# Altium footprint library SYNCBOX_TST.PcbLib: 267 footprints (part 7 of 17)
Each footprint in its own frame and in the unit in brackets; x right, y up, seen from the top. Pads: shape width x height; smd on the part's side, far side on the other; paste and mask are expansions set on the pad; w line width, h text height; cw(c..) or ccw(c..) is an arc to the next point about the centre after c.
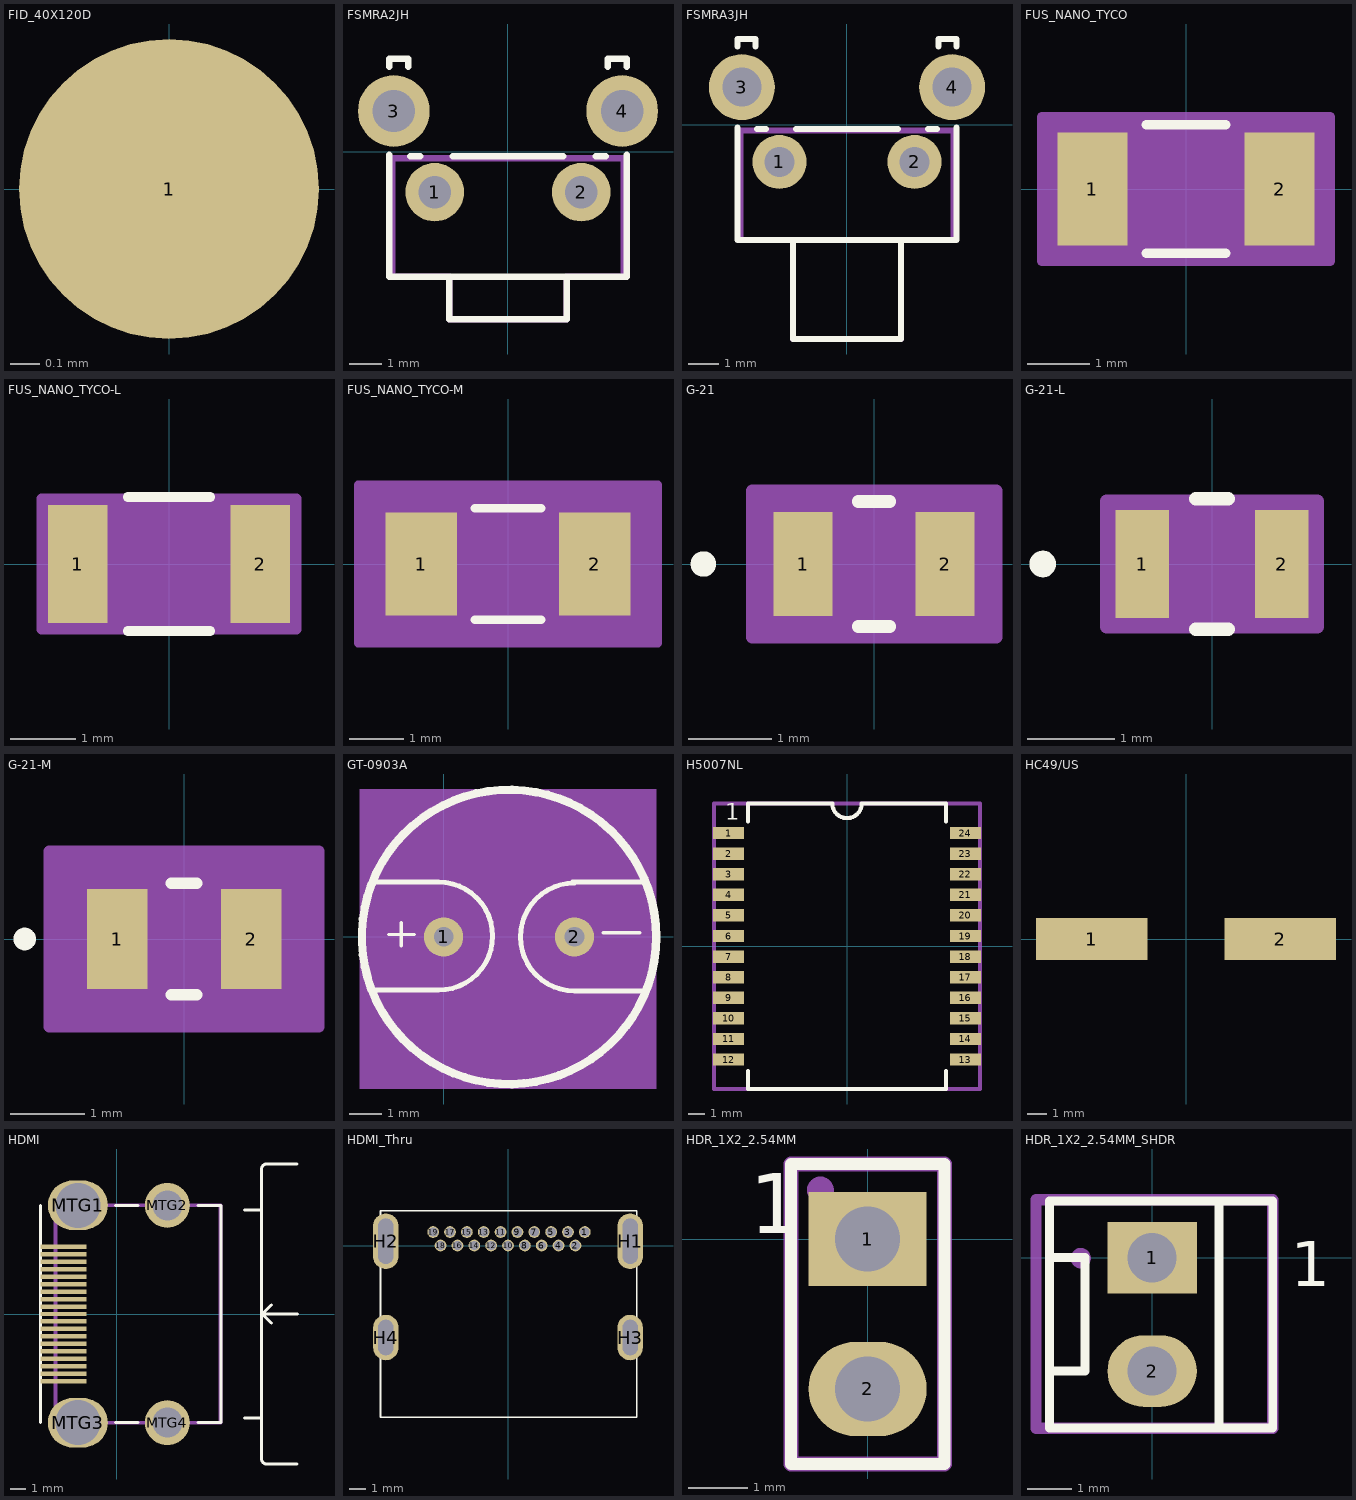
[diagram p6: the footprints below, top view; thin cyan lines are the x and y axes]

## FID_40X120D [mil]
pads (1):
  round 40 smd paste-40 mask+40: 1(0,0)

## FSMRA2JH [mm]
pads (4):
  round 1.8 hole 1: 1(-2.25,-1.245) 2(2.25,-1.245)
  round 2.2 hole 1.3: 3(-3.505,1.245) 4(3.505,1.245)
Top Overlay:
  lines w0.2: -3.65,-0.1 -3.65,-3.845 3.65,-3.845 3.65,-0.1 ; -3.65,2.6 -3.65,2.85 -3.055,2.85 -3.055,2.6 ; -3,-0.145 -2.7,-0.145 ; -1.8,-3.845 -1.8,-5.145 1.8,-5.145 1.8,-3.845 ; -1.7,-0.145 1.7,-0.145 ; 2.7,-0.145 3,-0.145 ; 3.055,2.6 3.055,2.85 3.65,2.85 3.65,2.6
Mechanical 16:
  lines w0.2: -3.55,-3.845 -1.8,-3.845 -1.8,-5.145 1.8,-5.145 1.8,-3.845 3.55,-3.845 3.55,-0.2 -3.55,-0.2 -3.55,-3.845
Mechanical 29:
  text ".Designator" at -1.5,-2.5 h1.2
3D body "c-1825027-5-g1-3d.stp": height 7.05, standoff -3.47, extent -4.204,-5.094 4.204,2.767

## FSMRA3JH [mm]
pads (4):
  round 1.8 hole 1: 1(-2.25,-1.245) 2(2.25,-1.245)
  round 2.2 hole 1.3: 3(-3.505,1.245) 4(3.505,1.245)
Top Overlay:
  lines w0.2: -3.65,-0.1 -3.65,-3.845 3.65,-3.845 3.65,-0.1 ; -3.65,2.6 -3.65,2.85 -3.055,2.85 -3.055,2.6 ; -3,-0.145 -2.7,-0.145 ; -1.8,-3.845 -1.8,-7.145 1.8,-7.145 1.8,-3.845 ; -1.7,-0.145 1.7,-0.145 ; 2.7,-0.145 3,-0.145 ; 3.055,2.6 3.055,2.85 3.65,2.85 3.65,2.6
Mechanical 16:
  lines w0.2: -3.55,-3.845 -3.55,-0.2 3.55,-0.2 3.55,-3.845 1.8,-3.845 1.8,-7.145 -1.8,-7.145 -1.8,-3.845 -3.55,-3.845
Mechanical 29:
  text ".Designator" at -1.5,-2.5 h1.2
3D body "c-1825027-8-g1-3d.stp": height 7.05, standoff -3.47, extent -4.204,-7.101 4.204,2.741

## FUS_NANO_TYCO [mil]
pads (2):
  rect 44x71 smd paste+0 mask+0: 1(-59,0) 2(59,0)
Top Overlay:
  lines w6: -24.89,-40.5 24.89,-40.5 ; -24.89,40.5 24.89,40.5
Mechanical 13:
  lines w1: -67,-35.5 -67,35.5 ; -67,-35.5 -37,-35.5 -37,35.5 -67,35.5 ; -67,-35.5 67,-35.5 ; -67,-35.5 -67,35.5 ; -67,35.5 67,35.5 ; 67,-35.5 37,-35.5 37,35.5 67,35.5 ; 67,-35.5 67,35.5 ; 67,-35.5 67,35.5
Mechanical 15:
  region: 91,-45.5 -91,-45.5 -91,45.5 91,45.5
  lines w6: -91,-45.5 -91,45.5 91,45.5 91,-45.5 -91,-45.5
3D body "FUS_NANO_TYCO.step": height 39.02, standoff 0, extent -67.01,-35.51 67.01,35.52
3D body: height 10, standoff 0, extent 0,0 10,10

## FUS_NANO_TYCO-L [mil]
pads (2):
  rect 36x71 smd paste+0 mask+0: 1(-55,0) 2(55,0)
Top Overlay:
  lines w6: -24.89,-40.5 24.89,-40.5 ; -24.89,40.5 24.89,40.5
Mechanical 13:
  lines w1: -67,-35.5 -67,35.5 ; -67,-35.5 -37,-35.5 -37,35.5 -67,35.5 ; -67,-35.5 67,-35.5 ; -67,-35.5 -67,35.5 ; -67,35.5 67,35.5 ; 67,-35.5 37,-35.5 37,35.5 67,35.5 ; 67,-35.5 67,35.5 ; 67,-35.5 67,35.5
Mechanical 15:
  region: 77,-39.5 -77,-39.5 -77,39.5 77,39.5
  lines w6: -77,-39.5 -77,39.5 77,39.5 77,-39.5 -77,-39.5
3D body "FUS_NANO_TYCO-L.step": height 39.02, standoff 0, extent -67,-35.51 67.01,35.51
3D body: height 10, standoff 0, extent 0,0 10,10

## FUS_NANO_TYCO-M [mil]
pads (2):
  rect 52x75 smd paste+0 mask+0: 1(-63,0) 2(63,0)
Top Overlay:
  lines w6: -24.25,-40.5 24.25,-40.5 ; -24.25,40.5 24.25,40.5
Mechanical 13:
  lines w1: -67,-35.5 -67,35.5 ; -67,-35.5 -37,-35.5 -37,35.5 -67,35.5 ; -67,-35.5 67,-35.5 ; -67,-35.5 -67,35.5 ; -67,35.5 67,35.5 ; 67,-35.5 37,-35.5 37,35.5 67,35.5 ; 67,-35.5 67,35.5 ; 67,-35.5 67,35.5
Mechanical 15:
  region: 109,-57.5 -109,-57.5 -109,57.5 109,57.5
  lines w6: -109,-57.5 -109,57.5 109,57.5 109,-57.5 -109,-57.5
3D body "FUS_NANO_TYCO-M.step": height 39.02, standoff 0, extent -67,-35.51 67.01,35.51
3D body: height 10, standoff 0, extent 0,0 10,10

## G-21 [mil]
pads (2):
  rect 28x49 smd paste+0 mask+0: 1(-33.5,0) 2(33.5,0)
Top Overlay:
  circle w6: c-80.5,0 r3
  lines w6: -7.39,-29.5 7.39,-29.5 ; -7.39,29.5 7.39,29.5
Mechanical 13:
  circle w0: c-28.5,0 r3
  lines w1: -39.5,-24.5 -39.5,24.5 ; -39.5,-24.5 39.5,-24.5 ; -39.5,-24.5 -19.5,-24.5 -19.5,24.5 -39.5,24.5 ; -39.5,-24.5 -39.5,24.5 ; -39.5,24.5 39.5,24.5 ; 39.5,-24.5 39.5,24.5 ; 39.5,-24.5 39.5,24.5 ; 39.5,-24.5 19.5,-24.5 19.5,24.5 39.5,24.5
Mechanical 15:
  region: 57.5,-34.5 -57.5,-34.5 -57.5,34.5 57.5,34.5
  lines w6: -57.5,-34.5 57.5,-34.5 57.5,34.5 -57.5,34.5 -57.5,-34.5
3D body "G-21.stp": height 57.01, standoff 0, extent -39.49,-24.49 39.49,24.49
3D body: height 10, standoff 0, extent 0,0 10,10

## G-21-L [mil]
pads (2):
  rect 24x49 smd paste+0 mask+0: 1(-31.5,0) 2(31.5,0)
Top Overlay:
  circle w6: c-76.5,0 r3
  lines w6: -7.39,-29.5 7.39,-29.5 ; -7.39,29.5 7.39,29.5
Mechanical 13:
  circle w0: c-26.5,0 r3
  lines w1: -39.5,-24.5 -39.5,24.5 ; -39.5,-24.5 39.5,-24.5 ; -39.5,-24.5 -19.5,-24.5 -19.5,24.5 -39.5,24.5 ; -39.5,-24.5 -39.5,24.5 ; -39.5,24.5 39.5,24.5 ; 39.5,-24.5 39.5,24.5 ; 39.5,-24.5 39.5,24.5 ; 39.5,-24.5 19.5,-24.5 19.5,24.5 39.5,24.5
Mechanical 15:
  region: 47.5,-28.5 -47.5,-28.5 -47.5,28.5 47.5,28.5
  lines w6: -47.5,-28.5 47.5,-28.5 47.5,28.5 -47.5,28.5 -47.5,-28.5
3D body: height 10, standoff 0, extent 0,0 10,10
3D body "G-21-L.stp": height 57.01, standoff 0, extent -39.48,-24.49 39.49,24.49

## G-21-M [mil]
pads (2):
  rect 32x53 smd paste+0 mask+0: 1(-35.5,0) 2(35.5,0)
Top Overlay:
  circle w6: c-84.5,0 r3
  lines w6: -6.75,-29.5 6.75,-29.5 ; -6.75,29.5 6.75,29.5
Mechanical 13:
  circle w0: c-30.5,0 r3
  lines w1: -39.5,-24.5 -39.5,24.5 ; -39.5,-24.5 39.5,-24.5 ; -39.5,-24.5 -19.5,-24.5 -19.5,24.5 -39.5,24.5 ; -39.5,-24.5 -39.5,24.5 ; -39.5,24.5 39.5,24.5 ; 39.5,-24.5 39.5,24.5 ; 39.5,-24.5 39.5,24.5 ; 39.5,-24.5 19.5,-24.5 19.5,24.5 39.5,24.5
Mechanical 15:
  region: 71.5,-46.5 -71.5,-46.5 -71.5,46.5 71.5,46.5
  lines w6: -71.5,-46.5 71.5,-46.5 71.5,46.5 -71.5,46.5 -71.5,-46.5
3D body: height 10, standoff 0, extent 0,0 10,10
3D body "G-21-M.stp": height 57.01, standoff 0, extent -39.48,-24.49 39.49,24.49

## GT-0903A [mm]
pads (2):
  round 1.2 hole 0.6: 1(0,0) 2(4,0)
Top Overlay:
  circle w0.254: c2,0 r4.5
  lines w0.1: -1.676,0.076 -0.889,0.076 ; -1.295,-0.279 -1.295,0.432 ; 4.877,0.127 5.994,0.127
  lines w0.152: -2.159,-1.626 -0.152,-1.626 ccw(c-0.152,0.025) -0.152,1.676 -2.134,1.676 ; 3.937,1.676 6.172,1.676 ; 4,-1.651 cw(c4,0) 4,1.651 ; 4.013,-1.652 6.198,-1.651
Mechanical 15:
  rectangle: -2.565,-4.648 6.502,4.521
3D body "GT-0903A.step": height 4.21, standoff -4.8, extent -2.519,-4.525 6.481,4.475

## H5007NL [mil]
pads (24):
  rect 75x30 smd: 1(-287.5,275) 2(-287.5,225) 3(-287.5,175) 4(-287.5,125) 5(-287.5,75) 6(-287.5,25) 7(-287.5,-25) 8(-287.5,-75) 9(-287.5,-125) 10(-287.5,-175) 11(-287.5,-225) 12(-287.5,-275) 13(287.5,-275) 14(287.5,-225) 15(287.5,-175) 16(287.5,-125) 17(287.5,-75) 18(287.5,-25) 19(287.5,25) 20(287.5,75) 21(287.5,125) 22(287.5,175) 23(287.5,225) 24(287.5,275)
Top Overlay:
  lines w10: -240.16,-303.15 -240.16,-346.46 240.16,-346.46 240.16,-303.15 ; -240.16,303.15 -240.16,346.46 -37.66,346.46 ; -35.43,346.46 ccw(c0.01,346.46) 35.45,346.46 ; 37.66,346.46 240.16,346.46 240.16,303.15
  text "1" at -295.28,307.09 h40
Mechanical 16:
  circle w10: c-287.4,275.59 r3.94
  lines w10: -322.83,-346.46 322.83,-346.46 322.83,346.46 -322.83,346.46 -322.83,-346.46
Mechanical 29:
  text ".Designator" at -39.37,35.43 h60
3D body: height 216.93, standoff 0, extent -240.16,-346.46 240.16,346.46

## HC49/US [mm]
pads (2):
  rect 5.6x2.1 smd: 1(-4.75,0) 2(4.75,0)
3D body "ABLS.STEP": height 4.06, standoff -0.1, extent -6.452,-2.184 6.248,2.515

## HDMI [mm]
pads (23):
  rect 3.048x0.3 smd mask+0.025: 1(-3.556,4.5) 2(-3.556,4) 3(-3.556,3.5) 4(-3.556,3) 5(-3.556,2.5) 6(-3.556,2) 7(-3.556,1.5) 8(-3.556,1) 9(-3.556,0.5) 10(-3.556,0) 11(-3.556,-0.5) 12(-3.556,-1) 13(-3.556,-1.5) 14(-3.556,-2) 15(-3.556,-2.5) 16(-3.556,-3) 17(-3.556,-3.5) 18(-3.556,-4) 19(-3.556,-4.5)
  oval 4x3.3 hole 3: MTG1(-2.6,7.25) MTG3(-2.6,-7.25)
  round 3 hole 2: MTG2(3.36,7.25) MTG4(3.36,-7.25)
Top Overlay:
  lines w0.2: -5.1,-7.25 -5.1,7.25 ; -0.1,-7.25 1.4,-7.25 ; -0.1,7.25 1.4,7.25 ; 5.4,-7.25 6.9,-7.25 6.95,-7.2 6.95,7.25 ; 5.4,7.25 6.9,7.25 ; 8.5,-6.95 9.65,-6.95 ; 8.5,6.95 9.65,6.95 ; 9.95,10 12,10 ; 10,10 ccw(c9.975,9.675) 9.65,9.7 9.65,-9.7 ccw(c9.975,-9.675) 10,-10 12,-10 ; 10.3,-0.6 9.7,0 ; 10.3,0.6 9.7,0 ; 12.05,0 9.7,0
Mechanical 1:
  text "plastic may go over the board edge" at -6.6,9.6 h0.5
  text "doesnt fit on one place. Bottom" at -6.5,10.8 h0.5
  text "NOTE: Holes are big and connector" at -6.5,12 h0.5
Mechanical 16:
  lines w0.254: -4.1,-7.25 6.9,-7.25 6.9,7.25 -4.1,7.25 -4.1,-7.25
Mechanical 29:
  text ".Designator" at 0.5,2.3 h1.52
3D body "471510001.stp": height 6.28, standoff -2.1, extent -4.2,-7.5 7.95,7.5

## HDMI_Thru [mm]
pads (23):
  round 0.7 hole 0.55: 1(4.559,0.8) 2(4,0) 3(3.559,0.8) 4(3,0) 5(2.559,0.8) 7(1.559,0.8) 8(1,0) 9(0.559,0.8) 10(0,0) 11(-0.441,0.8) 12(-1,0) 13(-1.441,0.8) 14(-2,0) 15(-2.441,0.8) 16(-3,0) 17(-3.441,0.8) 18(-4,0) 19(-4.441,0.8)
  round 0.7 hole 0.5: 6(2,0)
  oval 1.524x3.302 hole 0.9 slot 2.7 at 90 deg: H1(7.25,0.254) H2(-7.25,0.254)
  oval 1.5x2.7 hole 0.9 slot 2.1 at 90 deg: H3(7.25,-5.461) H4(-7.25,-5.461)
Top Overlay:
  lines w0.102: -7.569,-10.185 7.645,-10.185 7.645,2.057 3.162,2.057 -4.127,2.057 -7.569,2.057 -7.569,-10.185
3D body "2000-1-1-20-00-BK.STEP": height 6.08, standoff -2.25, extent -7.449,-10.12 7.551,1.93

## HDR_1X2_2.54MM [mm]
pads (2):
  rect 2x1.6 hole 1.1: 1(0,0)
  oval 2x1.6 hole 1.1: 2(0,-2.54)
Top Overlay:
  lines w0.2: -1.3,-3.81 1.3,-3.81 1.3,1.27 -1.3,1.27 -1.3,-3.81
  text "1" at -2,0.1 h1.02
Mechanical 16:
  circle w0.254: c-0.8,0.83 r0.1
  lines w0.254: -1.3,-3.81 -1.3,1.27 1.3,1.27 1.3,-3.81 -1.3,-3.81
Mechanical 29:
  text ".Designator" at 0.5,-2.7 h1
3D body "77311-118-02lf.stp": height 8.4, standoff -3.1, extent -1.205,-3.62 1.205,1.06

## HDR_1X2_2.54MM_SHDR [mm]
pads (2):
  rect 2x1.6 hole 1.1: 1(0,0)
  oval 2x1.6 hole 1.1: 2(0,-2.54)
Top Overlay:
  lines w0.2: -2.3,-2.54 -1.5,-2.54 -1.5,0 -2.3,0 ; 1.5,-3.8 1.5,1.27 ; -2.3,-3.81 2.7,-3.81 2.7,1.27 -2.3,1.27 -2.3,-3.81
  text "1" at 3.1,-0.64 h1.02
Mechanical 16:
  circle w0.254: c-1.6,-0.01 r0.1
  lines w0.254: -2.6,-3.82 2.7,-3.82 2.7,1.3 -2.6,1.3 -2.6,-3.82
Mechanical 29:
  text ".Designator" at 0.5,-2.34 h1
3D body "76384-302LFc.stp": height 9.34, standoff -3.43, extent -2.6,-3.31 2.649,0.77